# Altium footprint library SON50P210X160X65-9N.PcbLib: 1 footprints
Each footprint in its own frame and in the unit in brackets; x right, y up, seen from the top. Pads: shape width x height; smd on the part's side, far side on the other; paste and mask are expansions set on the pad; w line width, h text height; cw(c..) or ccw(c..) is an arc to the next point about the centre after c.
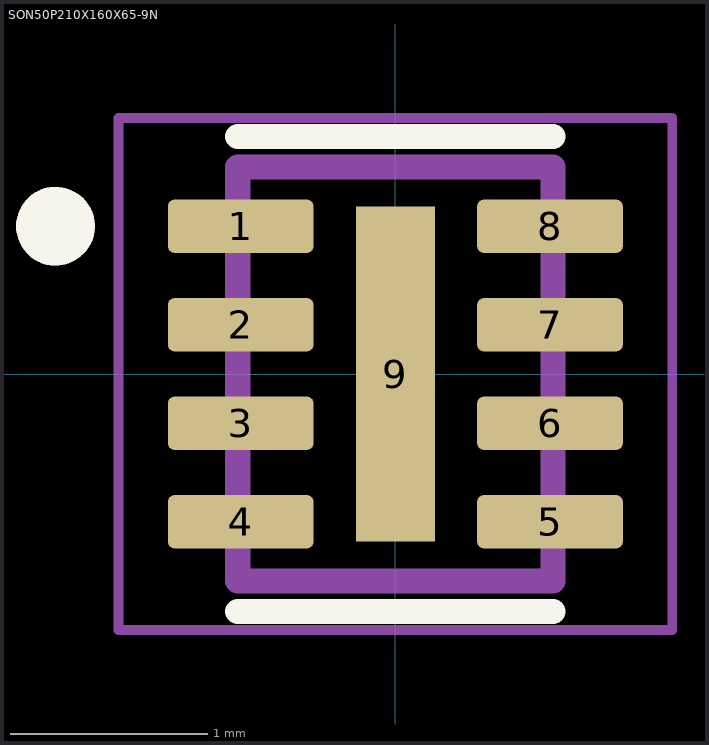
[diagram p0: the footprint, top view; thin cyan lines are the x and y axes]

## SON50P210X160X65-9N [mm]
height 0.65
pads (9):
  rrect25% 0.74x0.27 smd paste+0 mask+0.102: 1(-0.785,0.75) 2(-0.785,0.25) 3(-0.785,-0.25) 4(-0.785,-0.75) 5(0.785,-0.75) 6(0.785,-0.25) 7(0.785,0.25) 8(0.785,0.75)
  rect 0.4x1.7 smd paste-2 mask+0.102: 9(0,0)
Top Overlay:
  circle w0.2: c-1.725,0.75 r0.1
  lines w0.127: -0.8,-1.205 0.8,-1.205 ; -0.8,1.205 0.8,1.205
Top Paste:
  region: 0.13,-0.54 -0.13,-0.54 -0.13,0.54 0.13,0.54
Assembly Top:
  circle w0.2: c-1.725,0.75 r0.1
  lines w0.127: -0.8,-1.05 -0.8,1.05 0.8,1.05 0.8,-1.05 -0.8,-1.05
Courtyard Top:
  lines w0.05: -1.405,-1.3 -1.405,1.3 1.405,1.3 1.405,-1.3 -1.405,-1.3
3D body "step_temp.STEP": height 0.65, standoff 0, extent -0.8,-1.05 0.8,1.05